# Altium integrated library OSRAM_SFH4715B_Altium_Import_v3.Library.IntLib: 1 symbol
Pins are listed as number, name and electrical type; pins without a type are passive.

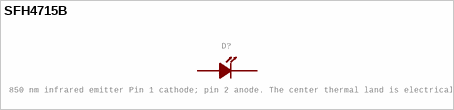
[diagram p0: symbol SFH4715B]

## SFH4715B
designator D?, comment OSRAM SFH 4715B, 850 nm infrared emitter Pin 1 cathode; pin 2 anode. The center thermal land is electrically pin 2/anode.
MANUFACTURER: ams OSRAM; GateName_1: G$1; PACKAGE_DRAWING: C63062-A4141-A1...-12; SymbolName_1: SFH4715B; LibraryName: OSRAM_SFH4715B_Altium_Import_v3; DeviceSetName: SFH4715B; Package: SFH4715B; MPN: SFH 4715B; DATASHEET_LAND_PATTERN: E062.3010.91-06
footprint SFH4715B
pins: 1, 2